# Altium footprint library TPS259474LRPWR.PcbLib: 1 footprints
Each footprint in its own frame and in the unit in brackets; x right, y up, seen from the top. Pads: shape width x height; smd on the part's side, far side on the other; paste and mask are expansions set on the pad; w line width, h text height; cw(c..) or ccw(c..) is an arc to the next point about the centre after c.
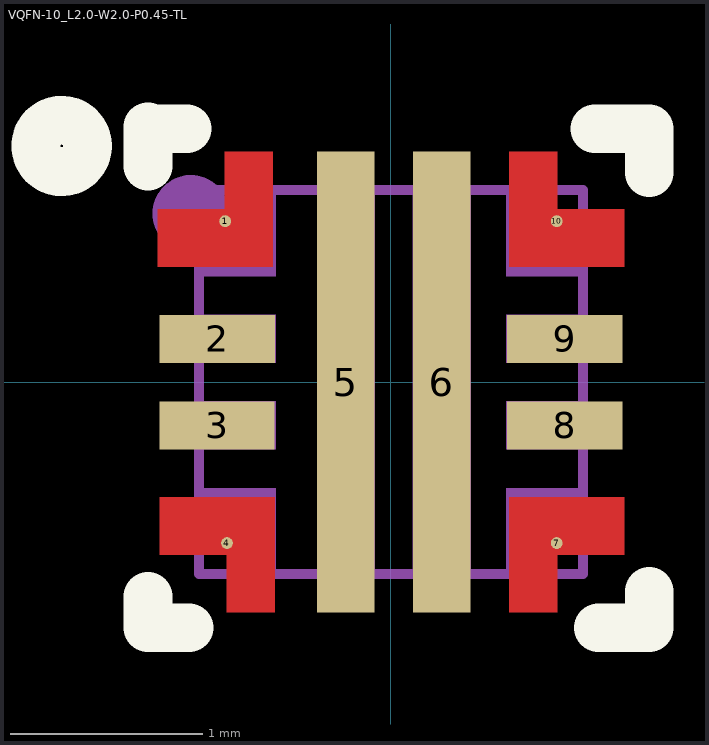
[diagram p0: the footprint, top view; thin cyan lines are the x and y axes]

## VQFN-10_L2.0-W2.0-P0.45-TL [mm]
pads (10):
  round 0.062 smd: 1(-0.864,0.838) 4(-0.854,-0.838) 7(0.864,-0.838) 10(0.864,0.838)
  rect 0.6x0.25 smd paste+0 mask+0.05: 2(-0.905,0.225) 3(-0.905,-0.225) 8(0.905,-0.225) 9(0.905,0.225)
  rect 0.3x2.4 smd paste+0 mask+0.05: 5(-0.235,0) 6(0.265,0)
Top Layer:
  region: 0.865,1.2 0.865,0.9 1.215,0.9 1.215,0.6 0.865,0.6 0.615,0.6 0.615,0.9 0.615,1.2
  region: 0.865,-1.2 0.865,-0.9 1.215,-0.9 1.215,-0.6 0.865,-0.6 0.615,-0.6 0.615,-0.9 0.615,-1.2
  region: -0.855,-1.2 -0.855,-0.9 -1.205,-0.9 -1.205,-0.6 -0.855,-0.6 -0.605,-0.6 -0.605,-0.9 -0.605,-1.2
  region: -0.865,1.2 -0.865,0.9 -1.215,0.9 -1.215,0.6 -0.865,0.6 -0.615,0.6 -0.615,0.9 -0.615,1.2
Top Overlay:
  circle w0.254: c-1.715,1.23 r0.135
  lines w0.254: -1.265,-1.117 -1.265,-1.28 -1.052,-1.28 ; -1.265,1.126 -1.265,1.33 ; -1.225,1.32 -1.062,1.32 ; 1.062,1.32 1.345,1.32 1.345,1.091 ; 1.082,-1.28 1.345,-1.28 1.345,-1.091
Mechanical 2:
  circle w0.2: c-1.042,0.878 r0.1
Mechanical 6:
  lines w0.051: -1,-1 1,-1 1,1 -1,1 -1,-1
Mechanical 8:
  region: -0.94,1 -0.94,0.975 -0.975,0.94 -1.025,0.94 -1.06,0.975 -1.06,1 -1.06,1.025 -1.025,1.06 -0.975,1.06 -0.94,1.025 -0.94,1
Mechanical 9:
  region: 0.115,1 0.415,1 0.415,-1 0.115,-1
  region: -0.385,1 -0.085,1 -0.085,-1 -0.385,-1
  region: 0.6,-1 0.6,-0.85 0.6,-0.553 1,-0.553 1,-0.853 0.85,-0.853 0.85,-1
  region: -0.6,-1 -0.6,-0.85 -0.6,-0.553 -1,-0.553 -1,-0.853 -0.85,-0.853 -0.85,-1
  region: 0.6,1 0.6,0.85 0.6,0.553 1,0.553 1,0.853 0.85,0.853 0.85,1
  region: -0.6,1 -0.6,0.85 -0.6,0.553 -1,0.553 -1,0.853 -0.85,0.853 -0.85,1
  region: 0.6,0.1 0.6,0.35 1,0.35 1,0.1
  region: 0.6,-0.35 0.6,-0.1 1,-0.1 1,-0.35
  region: -1,-0.35 -1,-0.1 -0.6,-0.1 -0.6,-0.35
  region: -1,0.1 -1,0.35 -0.6,0.35 -0.6,0.1